# Altium footprint library PTUMotorDriver.PcbLib: 51 footprints (part 2 of 4)
Each footprint in its own frame and in the unit in brackets; x right, y up, seen from the top. Pads: shape width x height; smd on the part's side, far side on the other; paste and mask are expansions set on the pad; w line width, h text height; cw(c..) or ccw(c..) is an arc to the next point about the centre after c.
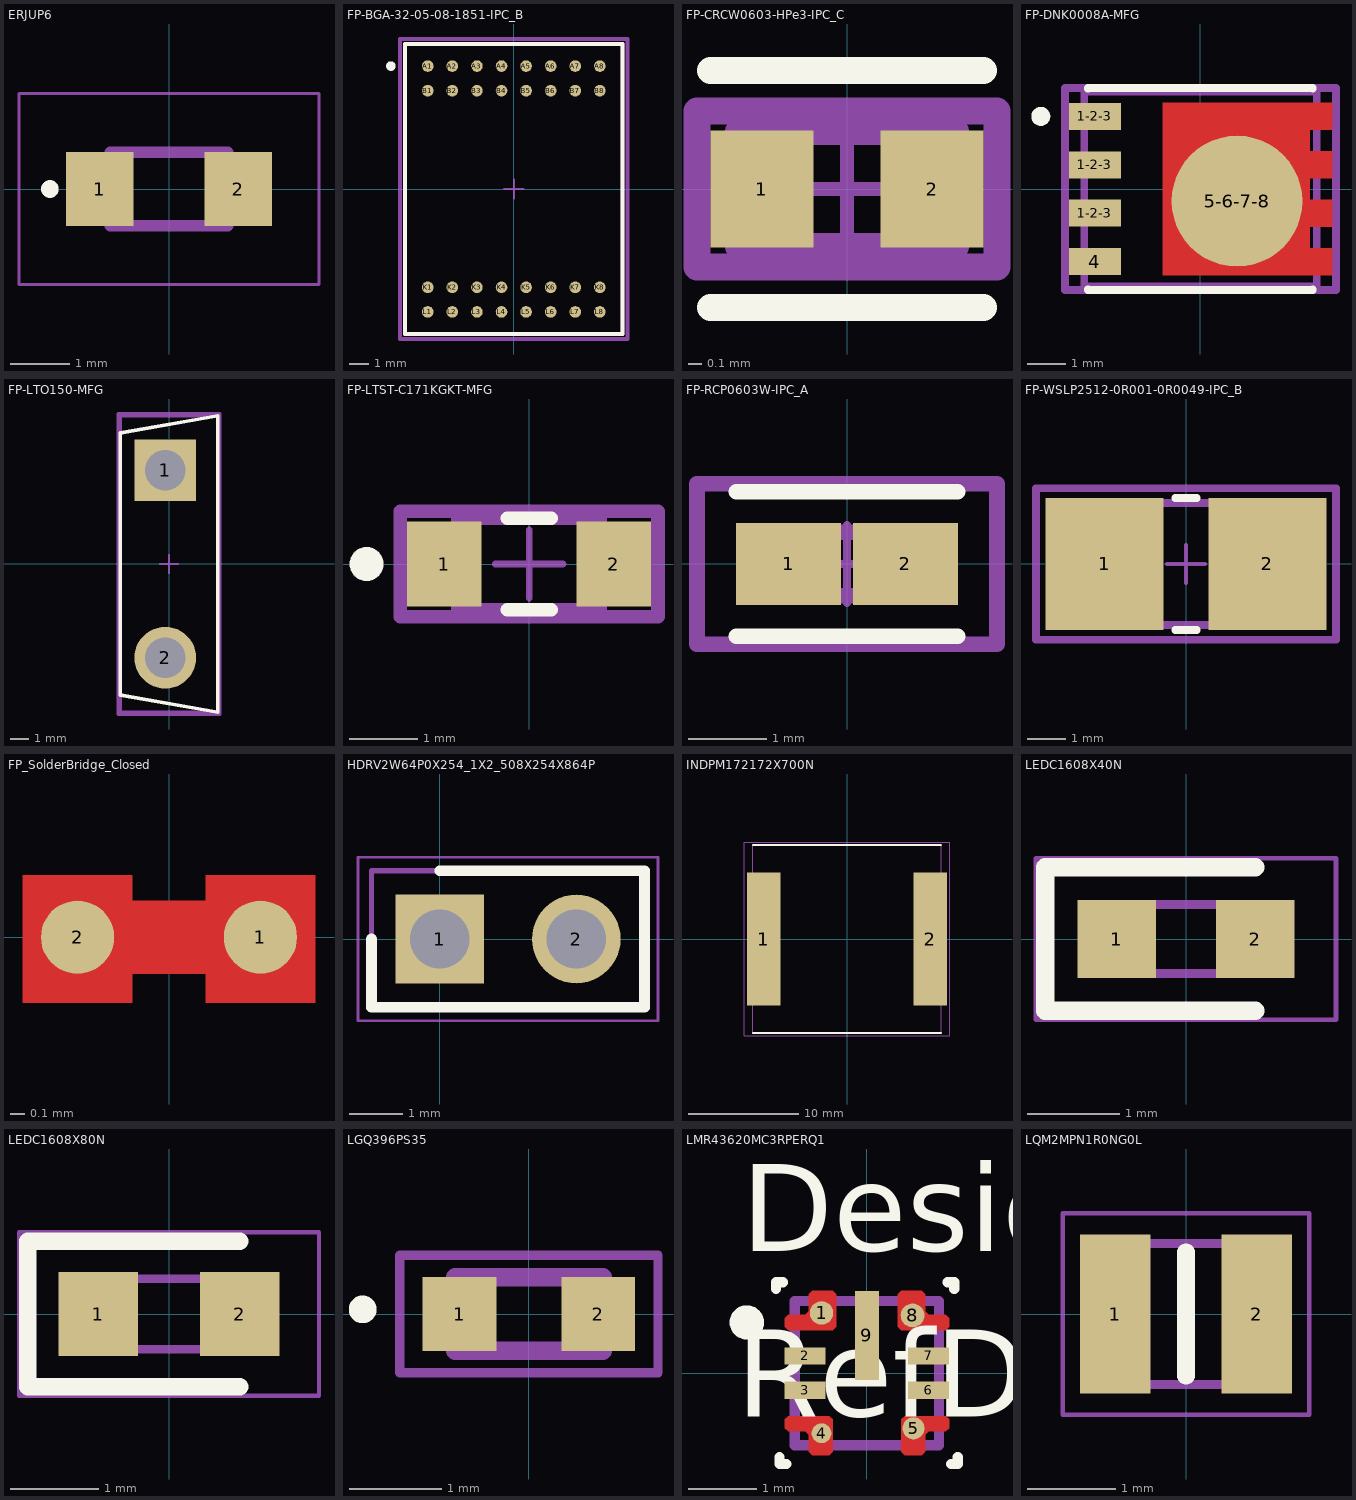
[diagram p1: the footprints below, top view; thin cyan lines are the x and y axes]

## ERJUP6 [mm]
pads (2):
  rect 1.15x1.25 smd: 1(-1.175,0) 2(1.175,0)
Top Overlay:
  circle w0.2: c-2.025,0 r0.05
Top 3D Body:
  lines w0.2: -1,-0.625 -1,0.625 1,0.625 1,-0.625 -1,-0.625
Top Courtyard:
  lines w0.05: -2.55,-1.625 -2.55,1.625 2.55,1.625 2.55,-1.625 -2.55,-1.625
3D body "ERJ-UP6D5101V.stp": height 0.6, standoff 0, extent -1,-0.625 1,0.625

## FP-BGA-32-05-08-1851-IPC_B [mm]
pads (32):
  round 0.6 smd paste+0 mask+0: A1(-4.445,6.35) A2(-3.175,6.35) A3(-1.905,6.35) A4(-0.635,6.35) A5(0.635,6.35) A6(1.905,6.35) A7(3.175,6.35) A8(4.445,6.35) B1(-4.445,5.08) B2(-3.175,5.08) B3(-1.905,5.08) B4(-0.635,5.08) B5(0.635,5.08) B6(1.905,5.08) B7(3.175,5.08) B8(4.445,5.08) K1(-4.445,-5.08) K2(-3.175,-5.08) K3(-1.905,-5.08) K4(-0.635,-5.08) K5(0.635,-5.08) K6(1.905,-5.08) K7(3.175,-5.08) K8(4.445,-5.08) L1(-4.445,-6.35) L2(-3.175,-6.35) L3(-1.905,-6.35) L4(-0.635,-6.35) L5(0.635,-6.35) L6(1.905,-6.35) L7(3.175,-6.35) L8(4.445,-6.35)
Top Overlay:
  circle w0.25: c-6.35,6.35 r0.125
  lines w0.2: -5.625,-7.5 -5.625,7.5 5.625,7.5 5.625,-7.5 -5.625,-7.5
Top Assembly:
  lines w0.2: -5.875,-7.75 -5.875,7.75 5.875,7.75 5.875,-7.75 -5.875,-7.75
  text ".Designator" at 0,0 h1
Top 3D Body:
  lines w0.2: -5.625,-7.5 -5.625,7.5 5.625,7.5 5.625,-7.5 -5.625,-7.5
Top Courtyard:
  lines w0.2: -5.875,-7.75 -5.875,7.75 5.875,7.75 5.875,-7.75 -5.875,-7.75
Top Component Center:
  lines w0.1: -0.5,0 0.5,0 ; 0,-0.5 0,0.5
3D body "IC_Analog_Devices_LTM2881IY-3_eec.STEP": height 0.25, standoff 0, extent -5.875,-7.75 5.875,7.75

## FP-CRCW0603-HPe3-IPC_C [mm]
pads (2):
  rect 0.758x0.862 smd paste+0 mask+0: 1(-0.627,0) 2(0.627,0)
Top Overlay:
  lines w0.2: -1.006,-0.875 1.006,-0.875 ; -1.006,0.875 1.006,0.875
Top Assembly:
  lines w0.2: -1.106,-0.575 1.106,-0.575 1.106,0.575 -1.106,0.575 -1.106,-0.575
  text ".Designator" at 0,0.188 h1
Top 3D Body:
  lines w0.2: -0.8,-0.425 0.8,-0.425 0.8,0.425 -0.8,0.425 -0.8,-0.425
Top Courtyard:
  lines w0.2: -1.106,-0.575 1.106,-0.575 1.106,0.575 -1.106,0.575 -1.106,-0.575
Top Component Center:
  lines w0.1: -0.5,0 0.5,0 ; 0,-0.5 0,0.5
3D body "Res_Vishay_CRCW06031K00FKEAHP_eec.STEP": height 0.25, standoff 0, extent -1.106,-0.575 1.106,0.575

## FP-DNK0008A-MFG [mm]
pads (5):
  rect 1.372x0.71 smd paste-1000 mask+0: 1-2-3(-2.77,-0.635) 1-2-3(-2.77,0.635) 1-2-3(-2.77,1.905) 4(-2.77,-1.905)
  round 3.434 smd paste-1000 mask+0: 5-6-7-8(0.958,-0.318)
Top Layer:
  region: -0.984,-2.26 3.456,-2.26 3.456,-1.55 2.866,-1.55 2.866,-0.99 3.456,-0.99 3.456,-0.28 2.866,-0.28 2.866,0.28 3.456,0.28 3.456,0.99 2.866,0.99 2.866,1.55 3.456,1.55 3.456,2.26 -0.984,2.26
Top Overlay:
  circle w0.25: c-4.191,1.905 r0.125
  lines w0.2: -2.95,-2.635 -2.95,-2.65 2.95,-2.65 2.95,-2.635 ; -2.95,2.635 -2.95,2.65 2.95,2.65 2.95,2.635
Top Paste:
  rectangle: -0.697,-1.942 0.597,-1.196
  rectangle: -0.697,-0.896 0.597,-0.15
  rectangle: -0.697,0.15 0.597,0.896
  rectangle: -0.697,1.196 0.597,1.942
  rectangle: 0.947,-1.942 2.241,-1.196
  rectangle: 0.947,-0.896 2.241,-0.15
  rectangle: 0.947,0.15 2.241,0.896
  rectangle: 0.947,1.196 2.241,1.942
  rectangle: 2.527,-2.159 3.293,-1.651
  rectangle: 2.527,-0.889 3.293,-0.381
  rectangle: 2.527,0.381 3.293,0.889
  rectangle: 2.527,1.651 3.293,2.159
  rectangle: -3.293,-2.186 -2.221,-1.624
  rectangle: -3.293,-0.916 -2.221,-0.354
  rectangle: -3.293,0.354 -2.221,0.916
  rectangle: -3.293,1.624 -2.221,2.186
Top Assembly:
  lines w0.2: -3.556,-2.65 -3.556,2.65 3.556,2.65 3.556,-2.65 -3.556,-2.65
  text ".Designator" at 0,0 h1
Top 3D Body:
  lines w0.2: -3.05,-2.55 -3.05,2.55 3.05,2.55 3.05,-2.55 -3.05,-2.55
Top Courtyard:
  lines w0.2: -3.556,-2.65 -3.556,2.65 3.556,2.65 3.556,-2.65 -3.556,-2.65
Top Component Center:
  lines w0.1: -0.5,0 0.5,0 ; 0,-0.5 0,0.5
3D body "Trans_Texas_Instruments_CSD19532Q5B_eec.STEP": height 0.25, standoff 0, extent -3.556,-2.65 3.556,2.65

## FP-LTO150-MFG [mm]
pads (2):
  rect 3.35x3.35 hole 2.2 paste-2539.97 mask+0: 1(-0.2,5.08)
  round 3.35 hole 2.2 paste-2539.97 mask+0: 2(-0.2,-5.08)
Top Overlay:
  lines w0.2: -2.65,-7.1 2.65,-8.03 2.65,8.03 -2.65,7.1 -2.65,-7.1
Top Assembly:
  lines w0.2: -2.75,-8.13 -2.75,8.13 2.75,8.13 2.75,-8.13 -2.75,-8.13
  text ".Designator" at 0,0 h1
Top 3D Body:
  lines w0.2: -2.65,-8.03 -2.65,8.03 2.65,8.03 2.65,-8.03 -2.65,-8.03
Top Courtyard:
  lines w0.2: -2.75,-8.13 -2.75,8.13 2.75,8.13 2.75,-8.13 -2.75,-8.13
Top Component Center:
  lines w0.1: -0.5,0 0.5,0 ; 0,-0.5 0,0.5
3D body "Res_Vishay_LTO150F1R000JTE3_eec.STEP": height 0.25, standoff 0, extent -2.75,-8.13 2.75,8.13

## FP-LTST-C171KGKT-MFG [mm]
pads (2):
  rect 1.1x1.25 smd paste+0 mask+0: 1(-1.25,0) 2(1.25,0)
Top Overlay:
  circle w0.25: c-2.4,0 r0.125
  lines w0.2: -0.325,-0.675 0.325,-0.675 ; -0.325,0.675 0.325,0.675
Top Assembly:
  lines w0.2: -1.9,-0.775 1.9,-0.775 1.9,0.775 -1.9,0.775 -1.9,-0.775
  text ".Designator" at 0,0 h1
Top 3D Body:
  lines w0.2: -1.05,-0.675 1.05,-0.675 1.05,0.675 -1.05,0.675 -1.05,-0.675
Top Courtyard:
  lines w0.2: -1.9,-0.775 1.9,-0.775 1.9,0.775 -1.9,0.775 -1.9,-0.775
Top Component Center:
  lines w0.1: -0.5,0 0.5,0 ; 0,-0.5 0,0.5
3D body "Diode_Lite-On_LTST-C171KGKT_eec.STEP": height 0.25, standoff 0, extent -1.9,-0.775 1.9,0.775

## FP-RCP0603W-IPC_A [mm]
pads (2):
  rect 1.345x1.049 smd paste+0 mask+0: 1(-0.747,0) 2(0.747,0)
Top Overlay:
  lines w0.2: -1.42,-0.925 1.42,-0.925 ; -1.42,0.925 1.42,0.925
Top Assembly:
  lines w0.2: -1.92,-1.025 1.92,-1.025 1.92,1.025 -1.92,1.025 -1.92,-1.025
  text ".Designator" at 0,0.188 h1
Top 3D Body:
  lines w0.2: -0.8,-0.405 0.8,-0.405 0.8,0.405 -0.8,0.405 -0.8,-0.405
Top Courtyard:
  lines w0.2: -1.92,-1.025 1.92,-1.025 1.92,1.025 -1.92,1.025 -1.92,-1.025
Top Component Center:
  lines w0.1: -0.5,0 0.5,0 ; 0,-0.5 0,0.5
3D body "Res_Vishay_RCP0603W50R0GEB_eec.STEP": height 0.25, standoff 0, extent -1.92,-1.025 1.92,1.025

## FP-WSLP2512-0R001-0R0049-IPC_B [mm]
pads (2):
  rect 3.072x3.439 smd paste+0 mask+0: 1(-2.119,0) 2(2.119,0)
Top Overlay:
  lines w0.2: -0.283,-1.719 0.283,-1.719 ; -0.283,1.719 0.283,1.719
Top Assembly:
  lines w0.2: -3.904,-1.969 -3.904,1.969 3.904,1.969 3.904,-1.969 -3.904,-1.969
  text ".Designator" at 0,0.188 h1
Top 3D Body:
  lines w0.2: -3.175,-1.59 -3.175,1.59 3.175,1.59 3.175,-1.59 -3.175,-1.59
Top Courtyard:
  lines w0.2: -3.904,-1.969 -3.904,1.969 3.904,1.969 3.904,-1.969 -3.904,-1.969
Top Component Center:
  lines w0.1: -0.5,0 0.5,0 ; 0,-0.5 0,0.5
3D body "Res_Vishay_WSLP25122L000FEA_eec.STEP": height 0.25, standoff 0, extent -3.904,-1.969 3.904,1.969

## FP_SolderBridge_Closed [mil]
pads (2):
  round 20 smd mask+0: 1(25,0) 2(-25,0)
Top Layer:
  rectangle: -40,-18 -10,17
  rectangle: 10,-18 40,17
  lines w20: -10,0 10,0
Top Solder:
  rectangle: -41,-19 41,18

## HDRV2W64P0X254_1X2_508X254X864P [mm]
pads (2):
  rect 1.65x1.65 hole 1.1: 1(0,0)
  round 1.65 hole 1.1: 2(2.54,0)
Top Overlay:
  lines w0.2: -1.27,0 -1.27,-1.27 3.81,-1.27 3.81,1.27 0,1.27
Top 3D Body:
  lines w0.1: -1.27,-1.27 -1.27,1.27 3.81,1.27 3.81,-1.27 -1.27,-1.27
Top Courtyard:
  lines w0.05: -1.52,-1.52 -1.52,1.52 4.06,1.52 4.06,-1.52 -1.52,-1.52
3D body "M20-9990245.stp": height 8.64, standoff -3, extent -1.27,-1.27 3.81,1.27

## INDPM172172X700N [mm]
pads (2):
  rect 3.05x12.15 smd: 1(-7.6,0) 2(7.6,0)
Top Overlay:
  lines w0.2: -8.575,-8.575 8.575,-8.575 ; -8.575,8.575 8.575,8.575
Top 3D Body:
  lines w0.1: -8.575,-8.575 8.575,-8.575 8.575,8.575 -8.575,8.575 -8.575,-8.575
Top Courtyard:
  lines w0.05: -9.375,-8.825 9.375,-8.825 9.375,8.825 -9.375,8.825 -9.375,-8.825
3D body "IHLP6767GZER100M01.stp": height 6.89, standoff 0, extent -8.584,-8.592 8.591,8.584

## LEDC1608X40N [mm]
pads (2):
  rect 0.85x0.85 smd: 1(-0.75,0) 2(0.75,0)
Top Overlay:
  lines w0.2: 0.75,-0.775 -1.525,-0.775 -1.525,0.775 0.75,0.775
Top 3D Body:
  lines w0.1: -0.775,0.125 -0.525,0.375 ; -0.775,-0.375 -0.775,0.375 0.775,0.375 0.775,-0.375 -0.775,-0.375
Top Courtyard:
  lines w0.05: -1.625,-0.875 -1.625,0.875 1.625,0.875 1.625,-0.875 -1.625,-0.875
3D body "LY_Q396-P1Q2-36.stp": height 0.35, standoff 0, extent -0.83,-0.4 0.77,0.4

## LEDC1608X80N [mm]
pads (2):
  rect 0.9x0.95 smd: 1(-0.8,0) 2(0.8,0)
Top Overlay:
  lines w0.2: 0.8,-0.825 -1.6,-0.825 -1.6,0.825 0.8,0.825
Top 3D Body:
  lines w0.1: -0.8,0.133 -0.533,0.4 ; -0.8,-0.4 0.8,-0.4 0.8,0.4 -0.8,0.4 -0.8,-0.4
Top Courtyard:
  lines w0.05: -1.7,-0.925 1.7,-0.925 1.7,0.925 -1.7,0.925 -1.7,-0.925
3D body "LS_Q976-NR-1.stp": height 0.81, standoff 0, extent -0.83,-0.4 0.77,0.4

## LGQ396PS35 [mm]
pads (2):
  rect 0.8x0.8 smd: 1(-0.75,0) 2(0.75,0)
Top Overlay:
  lines w0.2: -1.8,0 ccw(c-1.8,0.05) -1.8,0.1 ; -1.8,0 cw(c-1.8,0.05) -1.8,0.1 ; -1.8,0 ccw(c-1.8,0.05) -1.8,0.1
Top 3D Body:
  lines w0.2: -0.8,-0.4 -0.8,0.4 0.8,0.4 0.8,-0.4 -0.8,-0.4
Top Courtyard:
  lines w0.1: -1.397,-0.635 -1.397,0.635 1.397,0.635 1.397,-0.635 -1.397,-0.635
3D body "LG_Q396-PS-35.stp": height 0.4, standoff 0, extent -0.84,-0.45 0.86,0.45

## LMR43620MC3RPERQ1 [mm]
pads (9):
  round 0.342 smd paste-0.158 mask+0: 1(-0.661,0.877)
  rect 0.6x0.25 smd paste+0 mask+0: 2(-0.9,0.25) 3(-0.9,-0.25) 6(0.9,-0.25) 7(0.9,0.25)
  round 0.291 smd paste+0 mask+0: 4(-0.661,-0.877)
  round 0.323 smd paste+0 mask+0: 5(0.68,-0.805)
  round 0.346 smd paste-0.16 mask+0: 8(0.665,0.841)
  rect 0.35x1.3 smd paste-0.637 mask+0: 9(0,0.55)
Top Layer:
  region: -1.2,0.676 -1.2,0.8 -1.15,0.851 -0.9,0.851 -0.85,0.901 -0.85,1.15 -0.8,1.2 -0.5,1.2 -0.45,1.15 -0.45,0.676 -0.5,0.625 -1.15,0.626
  region: -1.2,-0.676 -1.2,-0.8 -1.15,-0.85 -0.9,-0.851 -0.85,-0.901 -0.85,-1.15 -0.8,-1.2 -0.55,-1.2 -0.5,-1.15 -0.5,-0.676 -0.55,-0.625 -1.15,-0.626
  region: 1.2,-0.676 1.2,-0.8 1.15,-0.851 0.9,-0.85 0.85,-0.901 0.85,-1.15 0.8,-1.2 0.55,-1.2 0.5,-1.15 0.5,-0.676 0.55,-0.625 1.15,-0.626
  region: 1.2,0.676 1.2,0.8 1.15,0.85 0.9,0.851 0.85,0.901 0.85,1.15 0.8,1.2 0.5,1.2 0.45,1.15 0.45,0.676 0.5,0.625 1.15,0.626
Top Overlay:
  circle w0.25: c-1.75,0.738 r0.125
  lines w0.15: -1.325,1.225 -1.325,1.325 -1.225,1.325 ; -1.275,-1.225 -1.275,-1.325 -1.175,-1.325 ; 1.175,1.325 1.275,1.325 1.275,1.225 ; 1.225,-1.325 1.325,-1.325 1.325,-1.225
  text "RefDes" at -1.905,-0.635 h1.27
  text "Designator9" at -1.829,1.778 h1.27
Top Paste:
  region: -1.2,0.676 -1.2,0.8 -1.15,0.85 -0.9,0.851 -0.85,0.901 -0.85,1.075 -0.8,1.125 -0.5,1.125 -0.45,1.075 -0.45,0.676 -0.5,0.625 -1.15,0.626
  region: 1.2,0.676 1.2,0.801 1.15,0.851 0.9,0.851 0.85,0.901 0.85,1.076 0.8,1.126 0.5,1.126 0.45,1.076 0.45,0.676 0.5,0.626 1.15,0.626
  region: 0.175,1.15 0.175,0.7 0.125,0.65 -0.125,0.65 -0.175,0.7 -0.175,1.15 -0.125,1.2 0.125,1.2
  region: -0.125,-0.1 -0.175,-0.05 -0.175,0.4 -0.125,0.45 0.125,0.45 0.175,0.4 0.175,-0.05 0.125,-0.1
  region: -1.15,-0.85 -1.2,-0.8 -1.2,-0.676 -1.15,-0.626 -0.55,-0.625 -0.5,-0.676 -0.5,-1.15 -0.55,-1.2 -0.8,-1.2 -0.85,-1.15 -0.85,-0.901 -0.9,-0.851
  region: 1.2,-0.676 1.2,-0.8 1.15,-0.851 0.9,-0.85 0.85,-0.901 0.85,-1.15 0.8,-1.2 0.55,-1.2 0.5,-1.15 0.5,-0.676 0.55,-0.625 1.15,-0.626
Top Solder:
  region: -1.2,0.676 -1.2,0.8 -1.15,0.851 -0.9,0.851 -0.85,0.901 -0.85,1.15 -0.8,1.2 -0.5,1.2 -0.45,1.15 -0.45,0.676 -0.5,0.625 -1.15,0.626
  region: -1.15,-0.85 -1.2,-0.8 -1.2,-0.676 -1.15,-0.626 -0.55,-0.625 -0.5,-0.676 -0.5,-1.15 -0.55,-1.2 -0.8,-1.2 -0.85,-1.15 -0.85,-0.901 -0.9,-0.851
  region: 1.2,-0.676 1.2,-0.8 1.15,-0.851 0.9,-0.85 0.85,-0.901 0.85,-1.15 0.8,-1.2 0.55,-1.2 0.5,-1.15 0.5,-0.676 0.55,-0.625 1.15,-0.626
  region: 1.15,0.85 1.2,0.8 1.2,0.676 1.15,0.626 0.5,0.625 0.45,0.676 0.45,1.15 0.5,1.2 0.8,1.2 0.85,1.15 0.85,0.901 0.9,0.851
Top 3D Body:
  lines w0.15: -1.05,-1.05 1.05,-1.05 1.05,1.05 -1.05,1.05 -1.05,-1.05

## LQM2MPN1R0NG0L [mm]
pads (2):
  rect 0.8x1.8 smd: 1(-0.8,0) 2(0.8,0)
Top Overlay:
  lines w0.2: 0,-0.7 0,0.7
Top 3D Body:
  lines w0.1: -1,-0.8 -1,0.8 1,0.8 1,-0.8 -1,-0.8
Top Courtyard:
  lines w0.05: -1.397,-1.143 -1.397,1.143 1.397,1.143 1.397,-1.143 -1.397,-1.143
3D body "LQM2MPN2R2MG0L.stp": height 0.9, standoff 0, extent -1,-0.8 1,0.8